# Altium footprint library Tony_.PcbLib: 94 footprints (part 2 of 6)
Each footprint in its own frame and in the unit in brackets; x right, y up, seen from the top. Pads: shape width x height; smd on the part's side, far side on the other; paste and mask are expansions set on the pad; w line width, h text height; cw(c..) or ccw(c..) is an arc to the next point about the centre after c.
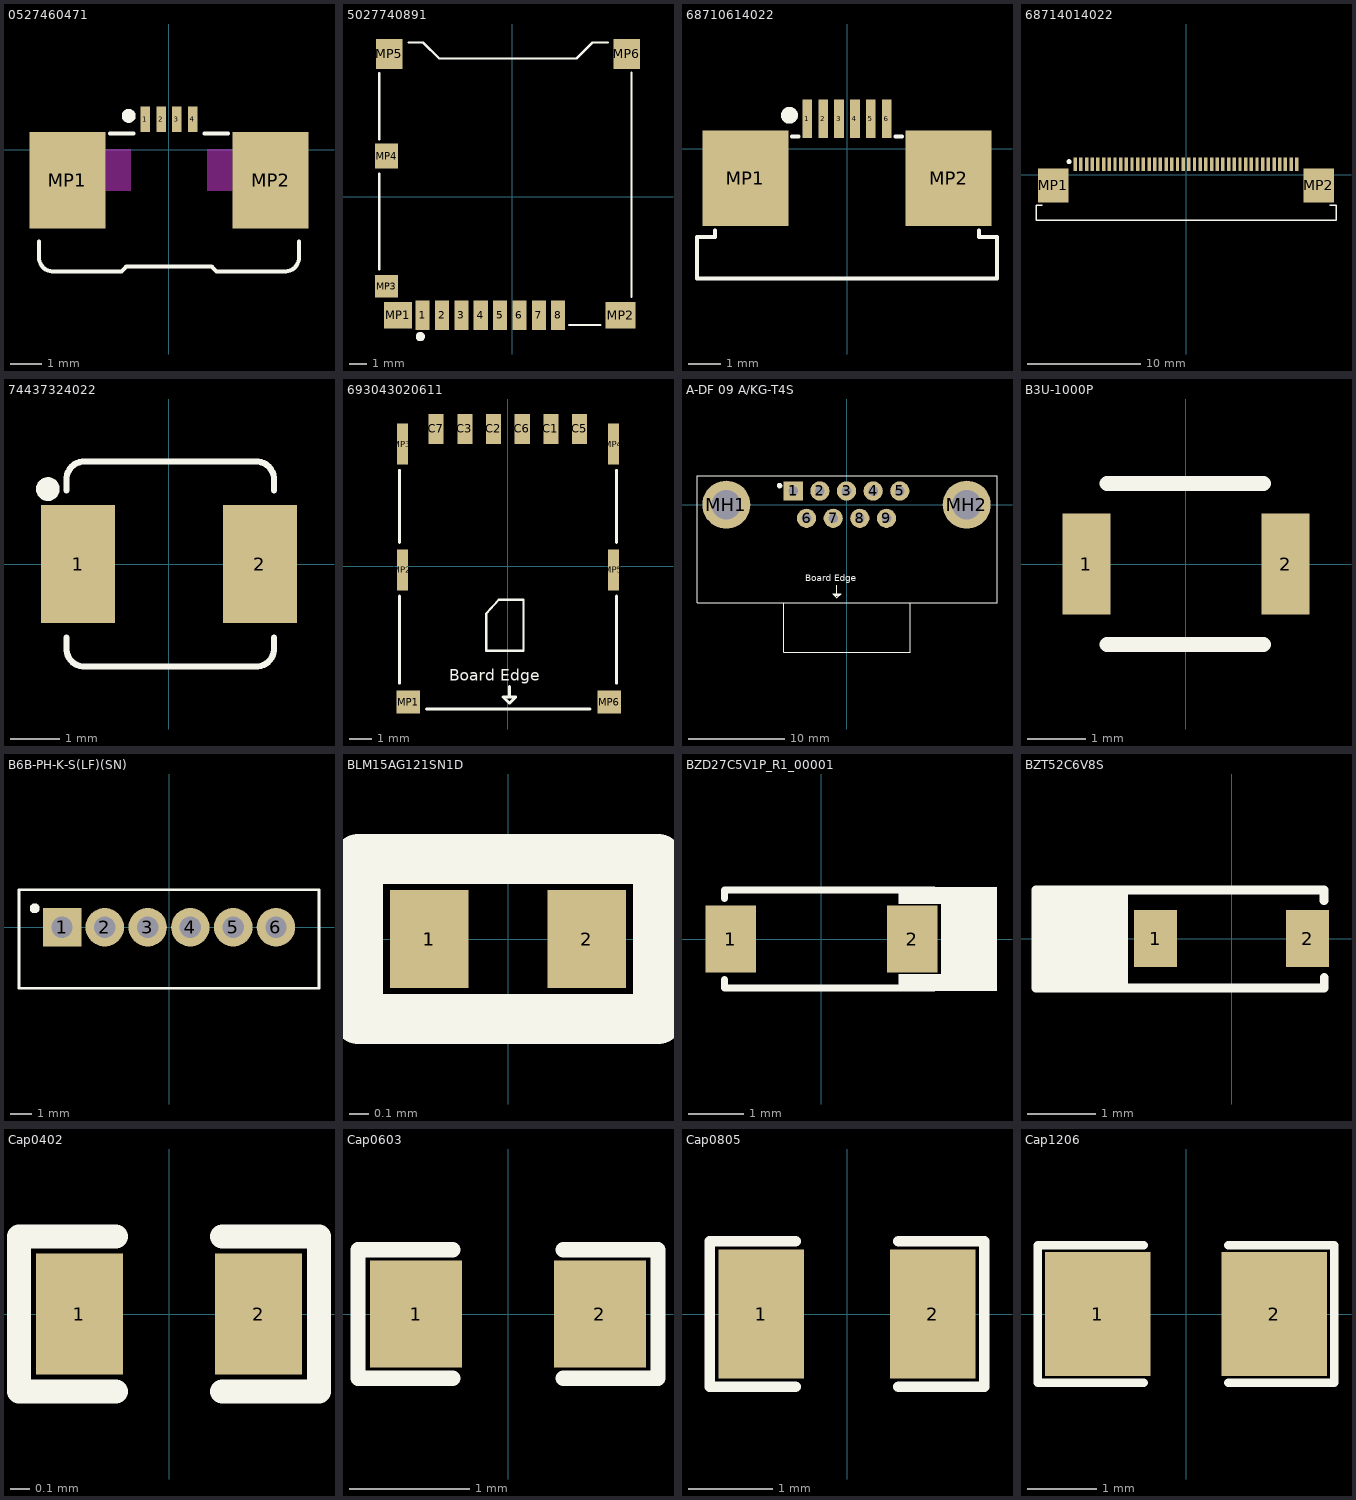
[diagram p1: the footprints below, top view; thin cyan lines are the x and y axes]

## 0527460471 [mm]
pads (6):
  rect 0.3x0.8 smd: 1(-0.75,0.962) 2(-0.25,0.962) 3(0.25,0.962) 4(0.75,0.962)
  rect 2.4x3.05 smd: MP1(-3.2,-0.962) MP2(3.2,-0.962)
Top Overlay:
  circle w0.254: c-1.27,1.067 r0.092
  lines w0.127: -4.089,-2.896 -4.089,-3.378 ccw(c-3.658,-3.404) -3.683,-3.835 -1.499,-3.835 -1.346,-3.683 1.346,-3.683 1.499,-3.835 3.683,-3.835 ccw(c3.658,-3.404) 4.089,-3.378 4.089,-2.896 ; -1.854,0.508 -1.118,0.508 ; 1.118,0.508 1.854,0.508
Keep-Out Layer:
  region: -1.2,-1.288 -2,-1.288 -2,0.012 -1.2,0.012
  region: 1.2,-1.288 2,-1.288 2,0.012 1.2,0.012
3D body "527460471.stp": height 2, standoff -0.02, extent -4.05,-3.81 4.05,1.19

## 5027740891 [mm] "CONN MICRO SD CARD PUSH-PUSH R/A"
pads (14):
  rect 0.8x1.68 smd: 1(-5.102,-6.74) 2(-4.002,-6.74) 3(-2.902,-6.74) 4(-1.803,-6.74) 5(-0.703,-6.74) 6(0.397,-6.74) 7(1.498,-6.74) 8(2.598,-6.74)
  rect 1.6x1.5 smd: MP1(-6.502,-6.74)
  rect 1.7x1.5 smd: MP2(6.148,-6.74)
  rect 1.29x1.3 smd: MP3(-7.157,-5.09)
  rect 1.29x1.4 smd: MP4(-7.157,2.31)
  rect 1.5x1.7 smd: MP5(-7.002,8.11) MP6(6.498,8.11)
Top Overlay:
  circle w0.254: c-5.232,-7.95 r0.137
  lines w0.127: -7.569,-4.14 -7.569,1.321 ; -7.569,3.251 -7.569,7.01 ; -5.893,8.763 -5.08,8.763 -4.166,7.849 3.632,7.849 4.547,8.763 5.41,8.763 ; 3.226,-7.29 5.004,-7.29 ; 6.756,-5.69 6.756,7.036
3D body "5027740891.stp": height 1.78, standoff -0.02, extent -7.514,-7.291 6.785,8.709

## 68710614022 [mm]
pads (8):
  rect 0.3x1.2 smd: 1(-1.25,0.93) 2(-0.75,0.93) 3(-0.25,0.93) 4(0.25,0.93) 5(0.75,0.93) 6(1.25,0.93)
  rect 2.7x3 smd: MP1(-3.18,-0.93) MP2(3.18,-0.93)
Top Overlay:
  circle w0.254: c-1.803,1.041 r0.137
  lines w0.127: -4.14,-2.565 -4.14,-2.769 -4.699,-2.769 -4.699,-4.064 4.699,-4.064 4.699,-2.769 4.14,-2.769 4.14,-2.565 ; -1.727,0.381 -1.524,0.381 ; 1.524,0.381 1.727,0.381
3D body "68710614022_Download_STP_68710614022_rev1.stp": height 2.08, standoff -0.02, extent -4.7,-4.059 4.7,1.041

## 68714014022 [mm]
pads (42):
  rect 0.3x1.2 smd: 1(-9.75,0.93) 2(-9.25,0.93) 3(-8.75,0.93) 4(-8.25,0.93) 5(-7.75,0.93) 6(-7.25,0.93) 7(-6.75,0.93) 8(-6.25,0.93) 9(-5.75,0.93) 10(-5.25,0.93) 11(-4.75,0.93) 12(-4.25,0.93) 13(-3.75,0.93) 14(-3.25,0.93) 15(-2.75,0.93) 16(-2.25,0.93) 17(-1.75,0.93) 18(-1.25,0.93) 19(-0.75,0.93) 20(-0.25,0.93) 21(0.25,0.93) 22(0.75,0.93) 23(1.25,0.93) 24(1.75,0.93) 25(2.25,0.93) 26(2.75,0.93) 27(3.25,0.93) 28(3.75,0.93) 29(4.25,0.93) 30(4.75,0.93) 31(5.25,0.93) 32(5.75,0.93) 33(6.25,0.93) 34(6.75,0.93) 35(7.25,0.93) 36(7.75,0.93) 37(8.25,0.93) 38(8.75,0.93) 39(9.25,0.93) 40(9.75,0.93)
  rect 2.7x3 smd: MP1(-11.68,-0.93) MP2(11.68,-0.93)
Top Overlay:
  circle w0.254: c-10.287,1.168 r0.092
  lines w0.127: -12.64,-2.667 -13.199,-2.667 -13.199,-4.013 -3.801,-4.013 5.597,-4.013 ; 3.801,-4.013 13.199,-4.013 13.199,-2.667 12.64,-2.667
3D body "68714014022_Download_STP_68714014022_rev1.stp": height 2.07, standoff -0.03, extent -13.2,-3.968 13.2,1.132

## 74437324022 [mm]
pads (2):
  rect 1.5x2.4 smd: 1(-1.85,0) 2(1.85,0)
Top Overlay:
  circle w0.254: c-2.464,1.524 r0.114
  lines w0.127: -2.083,-1.499 -2.083,-1.753 ccw(c-1.727,-1.727) -1.702,-2.083 1.753,-2.083 ccw(c1.778,-1.727) 2.134,-1.753 2.134,-1.499 ; -2.083,1.499 -2.083,1.753 cw(c-1.727,1.727) -1.702,2.083 1.753,2.083 cw(c1.778,1.727) 2.134,1.753 2.134,1.499
3D body "74437324010_Download_STP_WE-LHMI-4020_rev1.stp": height 1.7, standoff -0.1, extent -2.225,-2.03 2.225,2.03

## 693043020611 [mm] "CONN SMART CARD PUSH-PULL"
pads (12):
  rect 0.67x1.32 smd: C1(1.9,6.07) C2(-0.64,6.07) C3(-1.91,6.07) C5(3.17,6.07) C6(0.63,6.07) C7(-3.18,6.07)
  rect 1.05x1.02 smd: MP1(-4.416,-6.019) MP6(4.484,-6.019)
  rect 0.5x1.82 smd: MP2(-4.67,-0.17) MP3(-4.67,5.4) MP4(4.67,5.4) MP5(4.67,-0.17)
Top Overlay:
  lines w0.1: -0.964,-3.741 0.686,-3.741 0.686,-1.491 -0.409,-1.491 -0.964,-2.101 -0.964,-3.741
  lines w0.127: -4.801,-5.182 -4.801,-1.328 ; -4.801,1.041 -4.801,4.242 ; -3.607,-6.325 3.632,-6.325 ; 0.064,-5.334 0.064,-5.791 ; 4.801,-5.182 4.801,-1.328 ; 4.801,1.041 4.801,4.242 ; 0.064,-5.791 0.343,-5.791 0.064,-6.071 -0.216,-5.791 0.064,-5.791
  text "Board Edge" at -2.591,-5.066 h0.5
3D body "693043020611 (rev1).stp": height 1.2, standoff -0.01, extent -4.75,-6.25 4.75,6.25

## A-DF 09 A/KG-T4S [mm]
pads (11):
  rect 2x2 hole 1: 1(-5.54,1.42)
  round 2 hole 1: 2(-2.77,1.42) 3(0,1.42) 4(2.77,1.42) 5(5.54,1.42) 6(-4.155,-1.42) 7(-1.385,-1.42) 8(1.385,-1.42) 9(4.155,-1.42)
  round 5 hole 3.05: MH1(-12.495,0) MH2(12.495,0)
Top Overlay:
  circle w0.254: c-6.96,1.981 r0.152
  rectangle: -1.232,-9.474 -0.762,-9.246
  rectangle: -1.321,-9.398 -1.194,-9.296
  rectangle: -0.787,-9.398 -0.66,-9.296
  lines w0.127: -1.016,-8.407 -1.016,-9.246 ; -6.502,-10.185 -6.502,-15.367 6.604,-15.367 6.604,-10.185 ; -6.502,-10.185 -15.545,-10.185 -15.545,3.023 15.646,3.023 15.646,-10.185 6.604,-10.185 ; -6.502,-10.185 6.604,-10.185 ; -1.016,-9.246 -1.448,-9.246 -0.991,-9.703 -0.533,-9.246 -1.016,-9.246
  text "Board Edge" at -4.267,-7.971 h0.7
3D body "CONN_A-DF09AKG-T4S_ASM.step": height 12.8, standoff -3.17, extent -15.481,-15.331 15.583,2.957

## B3U-1000P [mm] "SWITCH TACTILE SPST-NO 0.05A 12V"
pads (2):
  rect 0.82x1.72 smd: 1(-1.7,0) 2(1.7,0)
Top Overlay:
  lines w0.254: -1.346,-1.372 0,-1.372 1.321,-1.372 ; -1.346,1.372 0,1.372 1.321,1.372
3D body "User Library-OMRON B3U1000P.step": height 1.6, standoff 0, extent -2,-1.263 2,1.237

## B6B-PH-K-S(LF)(SN) [mm]
pads (6):
  rect 1.8x1.8 hole 1: 1(-5,0)
  round 1.8 hole 1: 2(-3,0) 3(-1,0) 4(1,0) 5(3,0) 6(5,0)
Top Overlay:
  circle w0.254: c-6.274,0.889 r0.105
  lines w0.127: -7.01,-2.845 7.01,-2.845 7.01,1.753 -7.01,1.753 -7.01,-2.845
3D body "User Library-b6b-ph-ks.step": height 6, standoff -3, extent -6.95,-2.794 6.95,1.706

## BLM15AG121SN1D [mm] "FERRITE BEAD 120 OHM 0402 1LN"
pads (3):
  rect 0.4x0.5 smd: 1(-0.4,0) 1(-0.4,0) 2(0.4,0)
Top Overlay:
  lines w0.254: -0.762,-0.406 -0.762,0.406 0.762,0.406 0.762,-0.406 -0.762,-0.406
3D body "BLM15AG121SN1D.STEP": height 0.55, standoff 0, extent -0.5,-0.25 0.5,0.25

## BZD27C5V1P_R1_00001 [mm]
pads (2):
  rect 0.91x1.22 smd: 1(-1.64,0) 2(1.64,0)
Top Overlay:
  region: 2.286,-0.635 1.397,-0.635 1.397,-0.94 2.286,-0.94
  region: 2.286,0.94 1.397,0.94 1.397,0.635 2.286,0.635
  region: 3.175,0.94 2.159,0.94 2.159,-0.94 3.175,-0.94
  lines w0.127: -1.753,-0.737 -1.753,-0.889 2.032,-0.889 ; -1.753,0.737 -1.753,0.889 2.032,0.889
3D body "User Library-SOD-123FL.step": height 0.95, standoff 0.01, extent -1.794,-0.825 1.793,0.825

## BZT52C6V8S [mm] "- 6.8V 2uA @ 4V 200mW SOD-323 Zener Diodes ROHS"
pads (2):
  rect 0.63x0.83 smd: 1(-1.115,0) 2(1.115,0)
Top Overlay:
  rectangle: -2.87,-0.711 -1.524,0.711
  lines w0.127: 1.355,-0.573 1.355,-0.725 -2.87,-0.725 -2.87,0.711 1.355,0.711 1.355,0.559
3D body "SOD323_DIO.step": height 0.81, standoff 0, extent -1.35,-0.7 1.35,0.7

## Cap0402 [mil]
pads (2):
  rect 18x25 smd mask+2.36: 1(-18.5,0) 2(18.5,0)
Top Overlay:
  lines w5: -11,-16 -31,-16 -31,16 -11,16 ; 11,-16 31,-16 31,16 11,16
3D body "User Library-Capacitor 0402.step": height 18.5, standoff -1.18, extent -19.68,-9.84 19.7,9.85

## Cap0603 [mil]
pads (2):
  rect 30x35 smd mask+2.36: 1(-30,0) 2(30,0)
Top Overlay:
  lines w5: -18,-21 -49,-21 -49,21 -18,21 ; 18,-21 49,-21 49,21 18,21
3D body "User Library-CAPC1608X09.step": height 34.25, standoff -1.18, extent -31.51,-15.75 31.49,15.74

## Cap0805 [mil] "SMD 0805"
pads (2):
  rect 40x60 smd mask+2.76: 1(-40,0) 2(40,0)
Top Overlay:
  lines w5: -24,-34 -64,-34 -64,34 -24,34 ; 24,-34 64,-34 64,34 24,34
3D body "User Library-0805 SMD Capacitor.step": height 30, standoff -0.79, extent -39.36,-24.6 39.38,24.61

## Cap1206 [mil] "SMD 1206"
pads (2):
  rect 60x70 smd: 1(-50,0) 2(50,0)
Top Overlay:
  lines w5: -24,-39 -84,-39 -84,39 -24,39 ; 24,-39 84,-39 84,39 24,39
3D body "User Library-1206 SMD Capacitor.step": height 39.45, standoff 0, extent -62.96,-31.46 63.03,31.53